# Altium integrated library EMMC16G-TB29-90F01.IntLib: 1 symbol
Pins are listed as number, name and electrical type; pins without a type are passive.

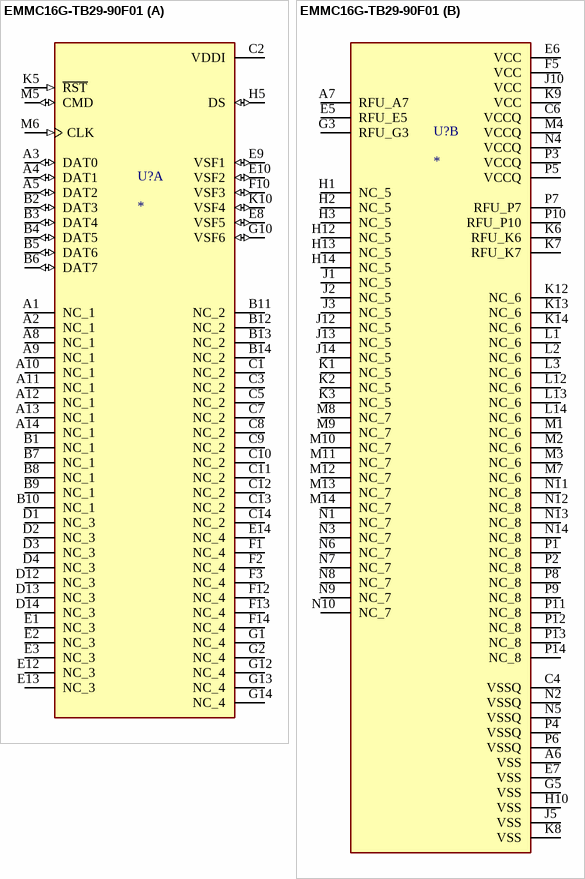
[diagram p0: symbol EMMC16G-TB29-90F01]

## EMMC16G-TB29-90F01
designator U?
eMMC 5.1 (HS400) 153B 16GB; MF: Kingston; MP: EMMC16G-TB29-90F01; SnapEDA_Link: https://www.snapeda.com/parts/EMMC16G-TB29-90F01/Kingston/view-part/?ref=snap; Package: None; Value: *; Check_prices: https://www.snapeda.com/parts/EMMC16G-TB29-90F01/Kingston/view-part/?ref=eda
footprint BGA153N50P14X14_1300X1150X100N
part A pins: A1 NC_1, A2 NC_1, A3 DAT0 (io), A4 DAT1 (io), A5 DAT2 (io), A8 NC_1, A9 NC_1, A10 NC_1, A11 NC_1, A12 NC_1, A13 NC_1, A14 NC_1, B1 NC_1, B2 DAT3 (io), B3 DAT4 (io), B4 DAT5 (io), B5 DAT6 (io), B6 DAT7 (io), B7 NC_1, B8 NC_1, B9 NC_1, B10 NC_1, B11 NC_2, B12 NC_2, B13 NC_2, B14 NC_2, C1 NC_2, C2 VDDI, C3 NC_2, C5 NC_2, C7 NC_2, C8 NC_2, C9 NC_2, C10 NC_2, C11 NC_2, C12 NC_2, C13 NC_2, C14 NC_2, D1 NC_3, D2 NC_3, D3 NC_3, D4 NC_3, D12 NC_3, D13 NC_3, D14 NC_3, E1 NC_3, E2 NC_3, E3 NC_3, E8 VSF5 (io), E9 VSF1 (io), E10 VSF2 (io), E12 NC_3, E13 NC_3, E14 NC_4, F1 NC_4, F2 NC_4, F3 NC_4, F10 VSF3 (io), F12 NC_4, F13 NC_4, F14 NC_4, G1 NC_4, G2 NC_4, G10 VSF6 (io), G12 NC_4, G13 NC_4, G14 NC_4, H5 DS (io), K5 ~{RST} (in), K10 VSF4 (io), M5 CMD (io), M6 CLK (in)
part B pins: A6 VSS (power), A7 RFU_A7, C4 VSSQ (power), C6 VCCQ (power), E5 RFU_E5, E6 VCC (power), E7 VSS (power), F5 VCC (power), G3 RFU_G3, G5 VSS (power), H1 NC_5, H2 NC_5, H3 NC_5, H10 VSS (power), H12 NC_5, H13 NC_5, H14 NC_5, J1 NC_5, J2 NC_5, J3 NC_5, J5 VSS (power), J10 VCC (power), J12 NC_5, J13 NC_5, J14 NC_5, K1 NC_5, K2 NC_5, K3 NC_5, K6 RFU_K6, K7 RFU_K7, K8 VSS (power), K9 VCC (power), K12 NC_6, K13 NC_6, K14 NC_6, L1 NC_6, L2 NC_6, L3 NC_6, L12 NC_6, L13 NC_6, L14 NC_6, M1 NC_6, M2 NC_6, M3 NC_6, M4 VCCQ (power), M7 NC_6, M8 NC_7, M9 NC_7, M10 NC_7, M11 NC_7, M12 NC_7, M13 NC_7, M14 NC_7, N1 NC_7, N2 VSSQ (power), N3 NC_7, N4 VCCQ (power), N5 VSSQ (power), N6 NC_7, N7 NC_7, N8 NC_7, N9 NC_7, N10 NC_7, N11 NC_8, N12 NC_8, N13 NC_8, N14 NC_8, P1 NC_8, P2 NC_8, P3 VCCQ (power), P4 VSSQ (power), P5 VCCQ (power), P6 VSSQ (power), P7 RFU_P7, P8 NC_8, P9 NC_8, P10 RFU_P10, P11 NC_8, P12 NC_8, P13 NC_8, P14 NC_8